# Altium footprint library aksima_footprint.PcbLib: 83 footprints (part 1 of 6)
Each footprint in its own frame and in the unit in brackets; x right, y up, seen from the top. Pads: shape width x height; smd on the part's side, far side on the other; paste and mask are expansions set on the pad; w line width, h text height; cw(c..) or ccw(c..) is an arc to the next point about the centre after c.
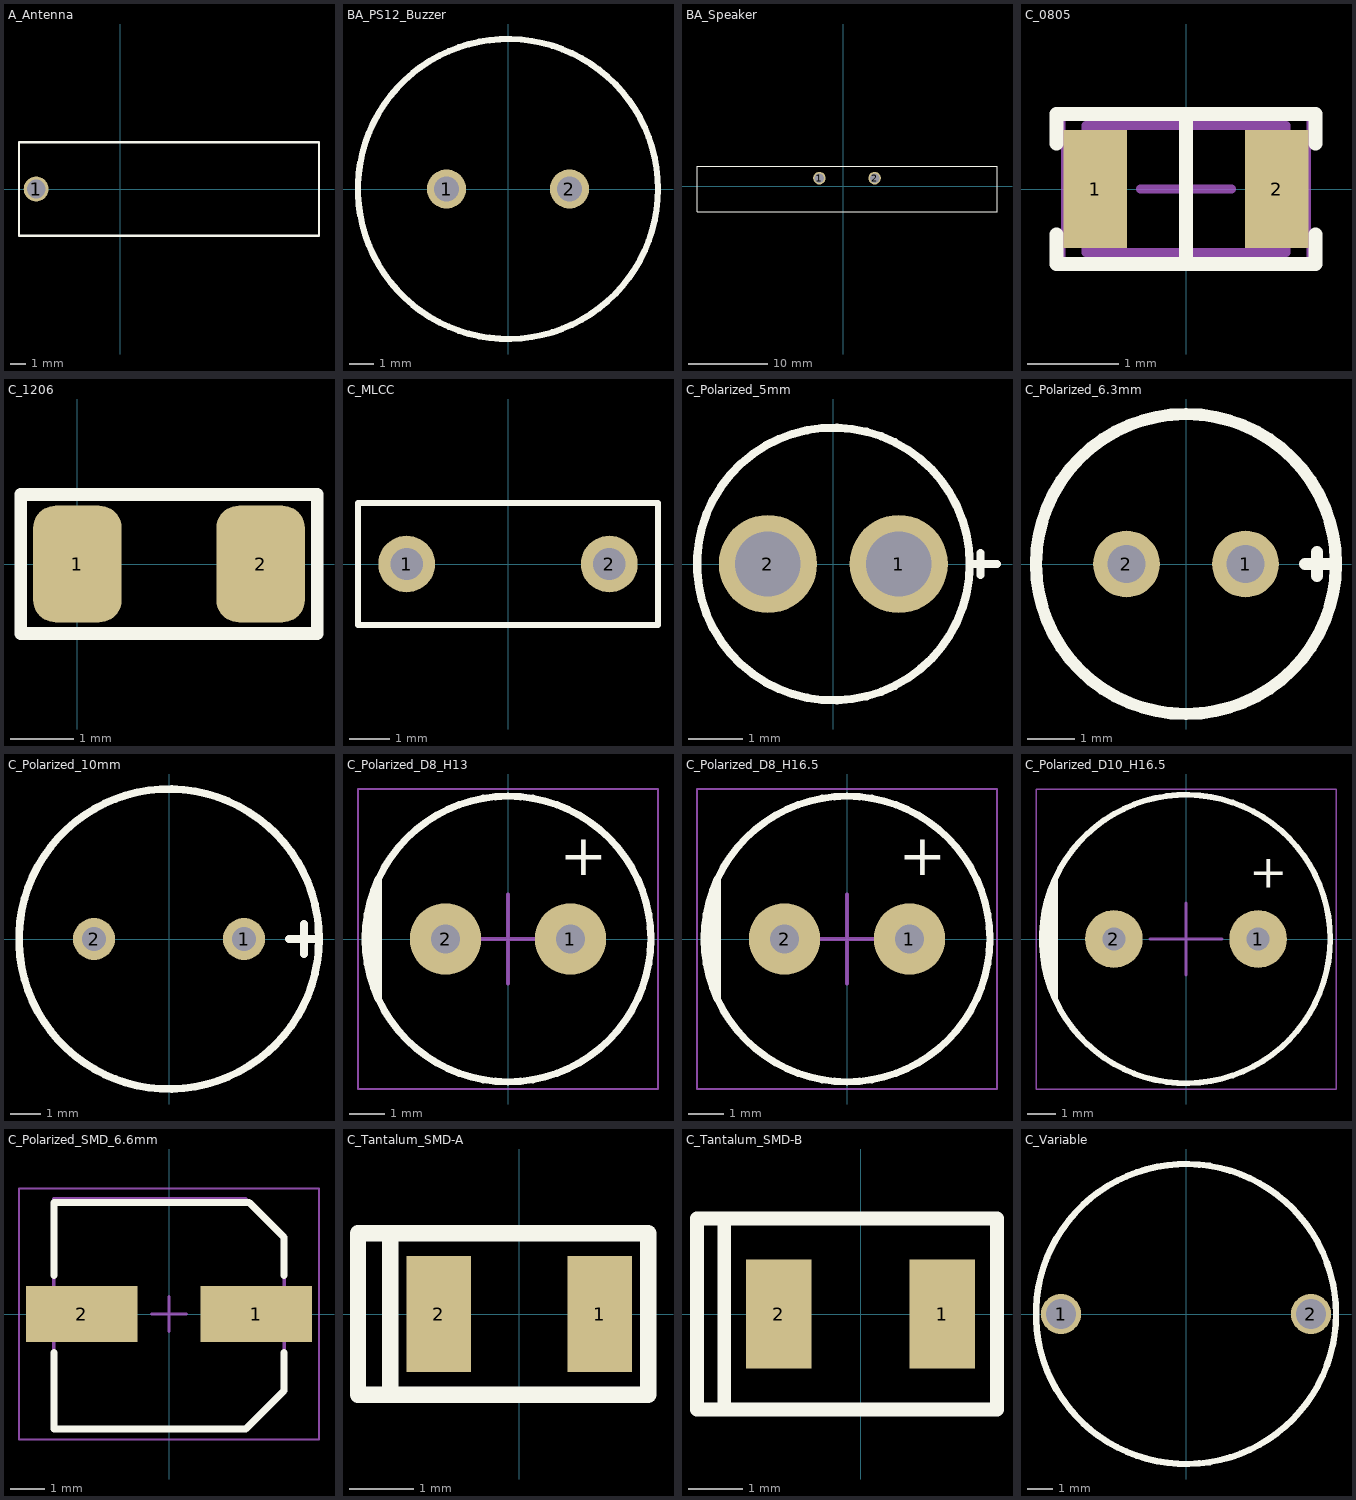
[diagram p0: the footprints below, top view; thin cyan lines are the x and y axes]

## A_Antenna [mm] "Antenna footprint, Antenna"
pads (1):
  round 1.6 hole 1.2: 1(-5.4,0)
Top Overlay:
  lines w0.15: -6.5,-3 12.75,-3 12.75,3 -6.5,3 -6.5,0 -6.5,-3
3D body "SW868-TH13.STEP": height 5.25, standoff -0.4, extent -5.8,-2.748 12.497,2.75

## BA_PS12_Buzzer [mm] "Acoustic transducer footprint, PS12 BUZZER"
pads (2):
  round 1.6 hole 1: 1(-2.5,0) 2(2.5,0)
Top Overlay:
  circle w0.254: c0,0 r6.1
3D body "Buzzer_TDK_pitch_5.stp": height 9, standoff -2, extent -6.1,-6.097 6.1,6.1

## BA_Speaker [mm] "Acoustic transducer footprint, Speaker"
pads (2):
  round 1.6 hole 1.2: 1(-3,1) 2(4,1)
Top Overlay:
  lines w0.15: -18.5,-3.25 19.5,-3.25 19.5,2.5 -18.5,2.5 -18.5,-3.25
3D body "CLS0281MAE-L152.step": height 33.76, standoff -2.56, extent -18.388,-2.95 19.388,2.25

## C_0805 [mm] "Chip Capacitor, 2-Leads, Body 2.00x1.20mm, IPC High Density"
height 1.15
pads (2):
  rect 0.7x1.3 smd: 1(-1,0) 2(1,0)
Top Overlay:
  lines w0.15: -1.425,-0.5 -1.425,-0.825 1.425,-0.825 1.425,-0.5 ; -1.425,0.5 -1.425,0.825 1.425,0.825 1.425,0.5 ; -0.025,0.825 0,0.825 0,-0.825
Mechanical 13:
  lines w0.1: -1.1,-0.7 -1.1,0.7 1.1,0.7 1.1,-0.7 -1.1,-0.7
Mechanical 15:
  lines w0.05: -1.35,-0.8 -1.35,0.8 1.35,0.8 1.35,-0.8 -1.35,-0.8
  lines w0.1: -0.5,0 0.5,0 ; 0,-0.5 0,0.5
3D body "0805 cap.STEP": height 1.26, standoff -0.02, extent -1,-0.637 1,0.637

## C_1206 [mm] "Capacitor footprint, 1206"
pads (2):
  rrect50% 1.4x1.85 smd: 1(0,0) 2(2.9,0)
Top Overlay:
  lines w0.2: -0.9,-1.1 -0.9,1.1 3.8,1.1 3.8,-1.1 -0.9,-1.1
3D body "CAPC1206.step": height 1, standoff 0, extent -0.1,-0.8 3.1,0.8

## C_MLCC [mm] "Multilayer ceramic capacitor"
pads (2):
  round 1.4 hole 0.8: 1(-2.5,0) 2(2.5,0)
Top Overlay:
  lines w0.15: -3.7,-1.5 3.7,-1.5 3.7,1.5 -3.7,1.5 -3.7,-1.5
3D body "330pF MLCC Ceramic Capacitor.SLDPRT": height 7.5, standoff -7, extent -2.788,-1.251 2.788,1.251

## C_Polarized_5mm [mm] "Polarized capacitor footprint, 5mm"
pads (2):
  round 1.8 hole 1.2: 1(1.2,0) 2(-1.2,0)
Top Overlay:
  circle w0.15: c0,0 r2.5
  lines w0.15: 2.5,0 3,0 ; 2.7,-0.2 2.7,0.2
3D body "ElCapVT-2.0-5x7.step": height 7, standoff -3, extent -2.501,-2.499 2.5,2.499

## C_Polarized_6.3mm [mm] "Polarized capacitor footprint, 6,3 MM"
pads (2):
  round 1.4 hole 0.8: 1(1.25,0) 2(-1.25,0)
Top Overlay:
  circle w0.254: c0,0 r3.15
  lines w0.254: 2.5,0 3.15,0 ; 2.75,-0.25 2.75,0.25
3D body "100uF 16V electr 6.3 x11mm -P.diameter 3.2mm-Black-White.stp": height 11, standoff -4.1, extent -3.15,-3.141 3.15,3.141

## C_Polarized_10mm [mm] "Polarized capacitor footprint, 10MM"
pads (2):
  round 1.4 hole 0.8: 1(2.5,0) 2(-2.5,0)
Top Overlay:
  circle w0.254: c0,0 r5
  lines w0.254: 4,0 5,0 ; 4.5,-0.5 4.5,0.5
3D body "1000uF 16V electr 10 x16mm  -P.diameter 5mm-Black-White.stp": height 16, standoff -4.1, extent -5,-4.996 5,4.996

## C_Polarized_D8_H13 [mm] "8mm Diameter 3.5mm Lead Spacing Aluminum Electrolytic Capacitors Radial, Can"
height 13
pads (2):
  round 2 hole 0.8: 1(1.75,0) 2(-1.75,0)
Top Overlay:
  circle w0.2: c0,0 r4
  region: -3.625,-1.69 -3.718,-1.493 -3.858,-1.079 -3.952,-0.653 -4,-0.218 -4,0.218 -3.952,0.653 -3.858,1.079 -3.718,1.493 -3.625,1.69
  lines w0.2: -3.625,-1.69 cw(c0,0) -3.625,1.69 -3.625,-1.69
  text "+" at 1.45,1.4 h2
Mechanical 13:
  circle w0.1: c0,0 r4
  lines w0.1: -3.625,-1.69 -3.625,1.69
Mechanical 15:
  lines w0.05: -4.2,-4.2 4.2,-4.2 4.2,4.2 -4.2,4.2 -4.2,-4.2
  lines w0.1: -1.25,0 0,0 ; 0,-1.25 0,0 ; 0,1.25 0,0 ; 1.25,0 0,0
3D body "Cap TH D8.00mm H13.00mm L3.50mm.step": height 13, standoff -2.5, extent -4.008,-3.999 4,3.999

## C_Polarized_D8_H16.5 [mm] "8mm Diameter 3.5mm Lead Spacing Aluminum Electrolytic Capacitors Radial, Can"
height 16.5
pads (2):
  round 2 hole 0.8: 1(1.75,0) 2(-1.75,0)
Top Overlay:
  circle w0.2: c0,0 r4
  region: -3.625,-1.69 -3.718,-1.493 -3.858,-1.079 -3.952,-0.653 -4,-0.218 -4,0.218 -3.952,0.653 -3.858,1.079 -3.718,1.493 -3.625,1.69
  lines w0.2: -3.625,-1.69 cw(c0,0) -3.625,1.69 -3.625,-1.69
  text "+" at 1.45,1.4 h2
Mechanical 13:
  circle w0.1: c0,0 r4
  lines w0.1: -3.625,-1.69 -3.625,1.69
Mechanical 15:
  lines w0.05: -4.2,-4.2 4.2,-4.2 4.2,4.2 -4.2,4.2 -4.2,-4.2
  lines w0.1: -1.25,0 0,0 ; 0,-1.25 0,0 ; 0,1.25 0,0 ; 1.25,0 0,0
3D body "Cap TH D8.00mm H16.50mm L3.50mm.step": height 16.5, standoff -2.5, extent -4.008,-3.999 4,3.999

## C_Polarized_D10_H16.5 [mm] "10mm Diameter 5mm Lead Spacing Aluminum Electrolytic Capacitors Radial, Can"
height 16.5
pads (2):
  round 2 hole 0.8: 1(2.5,0) 2(-2.5,0)
Top Overlay:
  circle w0.2: c0,0 r5
  region: -4.532,-2.113 -4.647,-1.866 -4.822,-1.349 -4.941,-0.816 -5,-0.273 -5,0.273 -4.941,0.816 -4.822,1.349 -4.647,1.866 -4.532,2.113
  lines w0.2: -4.532,-2.113 cw(c0,0) -4.532,2.113 -4.532,-2.113
  text "+" at 2.2,1.4 h2
Mechanical 13:
  circle w0.1: c0,0 r5
  lines w0.1: -4.532,-2.113 -4.532,2.113
Mechanical 15:
  lines w0.05: -5.2,-5.2 5.2,-5.2 5.2,5.2 -5.2,5.2 -5.2,-5.2
  lines w0.1: -1.25,0 0,0 ; 0,-1.25 0,0 ; 0,1.25 0,0 ; 1.25,0 0,0
3D body "Cap TH D10.00mm H16.50mm L5.00mm.step": height 16.5, standoff -2.5, extent -5.007,-5 5,5

## C_Polarized_SMD_6.6mm [mm] "Aluminum Electrolytic Capacitor, Body 6.60x6.60x5.40mm, IPC Low Density"
height 5.4
pads (2):
  rect 3.2x1.6 smd: 1(2.5,0) 2(-2.5,0)
Top Overlay:
  lines w0.2: -3.3,-1.1 -3.3,-3.3 2.2,-3.3 3.3,-2.2 3.3,-1.1 ; -3.3,1.1 -3.3,1.625 -3.3,2.675 -3.3,3.2 2.3,3.2 3.3,2.2 3.3,1.1
Mechanical 13:
  lines w0.1: -3.3,-3.3 2.2,-3.3 3.3,-2.2 3.3,2.2 2.2,3.3 -3.3,3.3 -3.3,-3.3
Mechanical 15:
  lines w0.05: -4.3,-3.6 -4.3,3.6 4.3,3.6 4.3,-3.6 -4.3,-3.6
  lines w0.1: -0.5,0 0.5,0 ; 0,-0.5 0,0.5
3D body "CAP ALSMD - 6.6 x 6.6 x 5.4.step": height 5.4, standoff 0, extent -3.5,-3.3 3.5,3.3

## C_Tantalum_SMD-A [mm] "SMD tantalum capacitor, case A"
pads (2):
  rect 1x1.8 smd: 1(1.25,0) 2(-1.25,0)
Top Overlay:
  lines w0.254: -2,-1.25 -2,-0.375 -2,0.375 -2,1.25 ; -2.5,-1.25 2,-1.25 2,1.25 -2.5,1.25 -2.5,-1.25
3D body "CAPM-TANTA-YL.stp": height 1.8, standoff 0, extent -1.7,-0.9 1.7,0.9

## C_Tantalum_SMD-B [mm] "SMD tantalum capacitor, case B"
pads (2):
  rect 1.2x2 smd: 1(1.5,0) 2(-1.5,0)
Top Overlay:
  lines w0.254: -2.5,-1.75 -2.5,1.75 ; -3,-1.75 2.5,-1.75 2.5,1.75 -3,1.75 -3,-1.75
3D body "CAPM-TANTB-BK.stp": height 2.1, standoff 0, extent -1.85,-1.5 1.85,1.5

## C_Variable [mm] "Capacitor footprint, variable capacitor"
pads (2):
  round 1.6 hole 1.2: 1(-5,0) 2(5,0)
Top Overlay:
  circle w0.254: c0,0 r6
3D body "Trimmer variable capacitor.step": height 9, standoff -2.5, extent -5.28,-5.28 5.28,5